# Altium footprint library CHIP-Library.PcbLib: 345 footprints (part 4 of 22)
Each footprint in its own frame and in the unit in brackets; x right, y up, seen from the top. Pads: shape width x height; smd on the part's side, far side on the other; paste and mask are expansions set on the pad; w line width, h text height; cw(c..) or ccw(c..) is an arc to the next point about the centre after c.
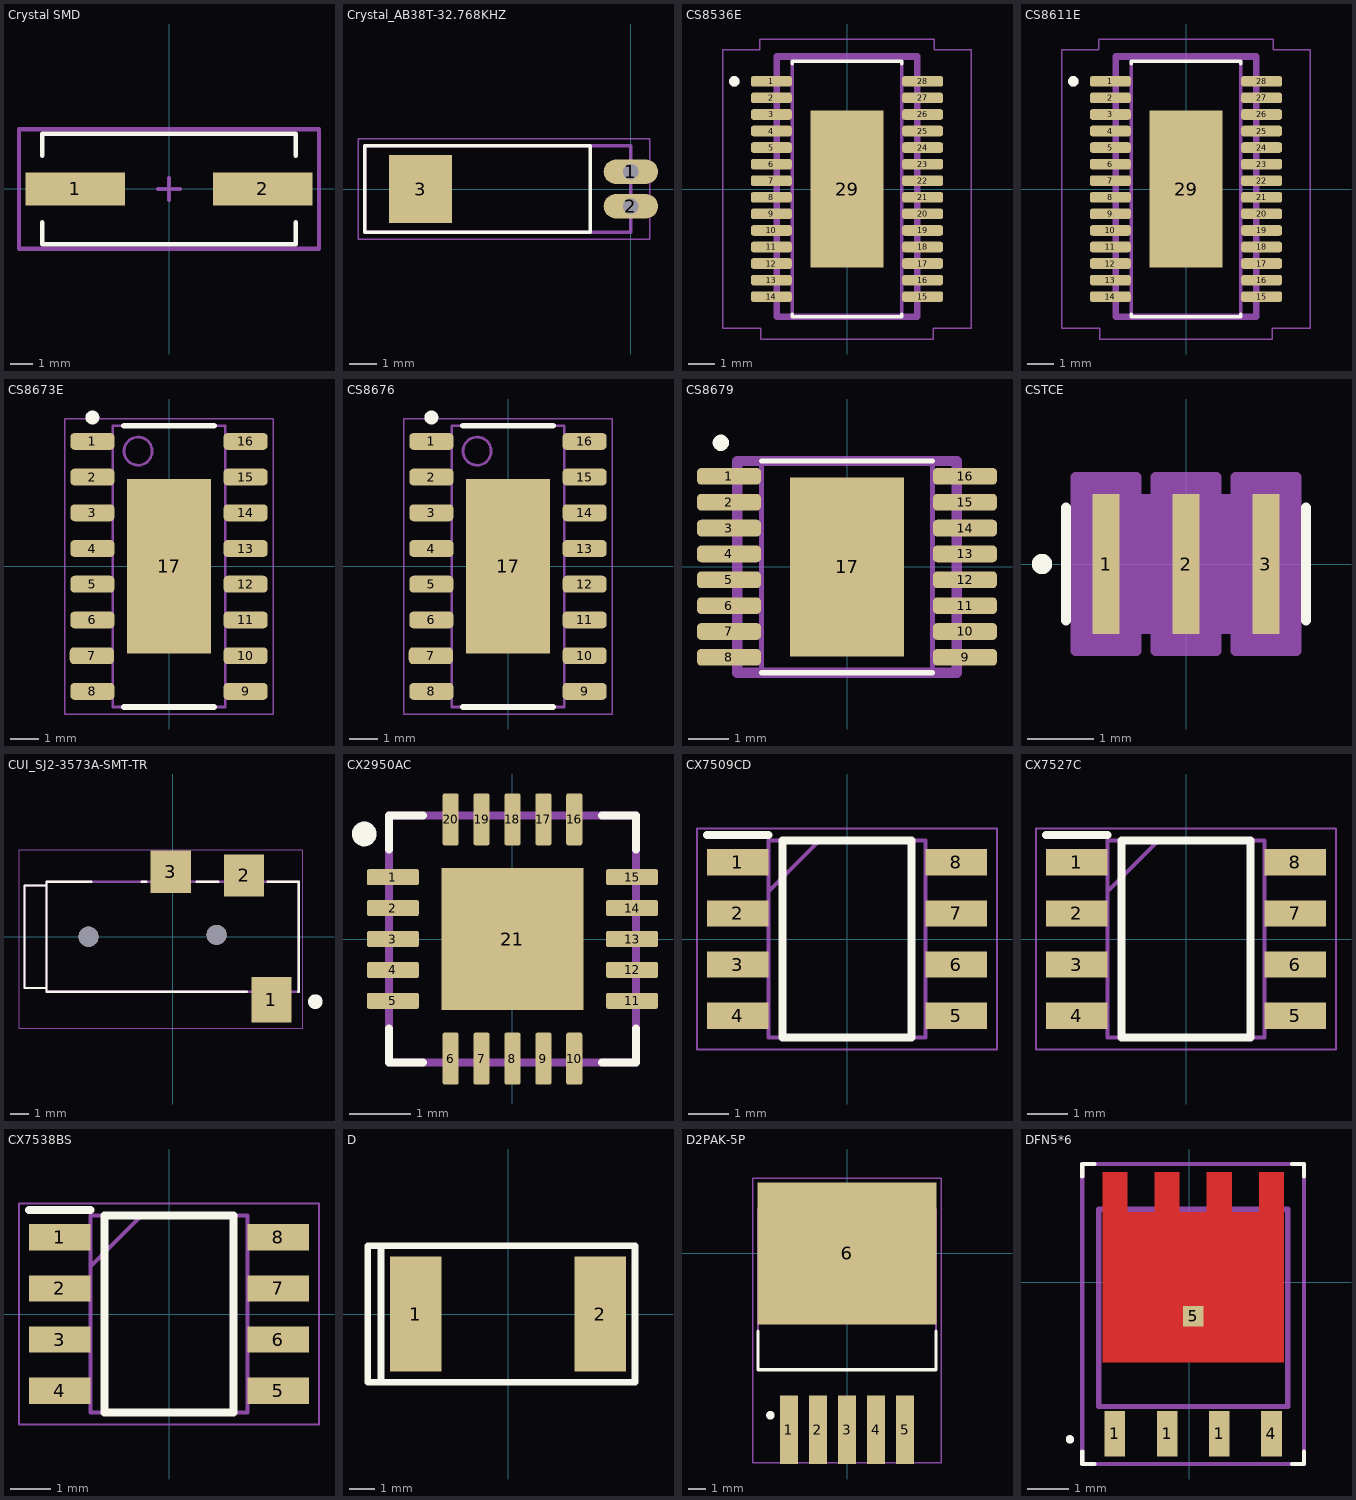
[diagram p3: the footprints below, top view; thin cyan lines are the x and y axes]

## Crystal SMD [mm] "DESIGNER ABBAS BASEREH"
height 4
pads (2):
  rect 4.5x1.5 smd: 1(-4.25,0) 2(4.25,0)
Top Overlay:
  lines w0.2: -5.75,-1.5 -5.75,-2.5 5.75,-2.5 5.75,-1.5 ; -5.75,1.5 -5.75,2.5 5.75,2.5 5.75,1.5
Mechanical 15:
  lines w0.2: -0.5,0 0.5,0 ; 0,-0.5 0,0.5 ; -6.8,-2.7 6.8,-2.7 6.8,2.7 -6.8,2.7 -6.8,-2.7
3D body "User Library-HC49_SMD.STEP": height 5.18, standoff 0, extent -6.209,-2.25 6.091,2.25

## Crystal_AB38T-32.768KHZ [mm] "XTAL_AB38T-32.768KHZ"
height 3.2
pads (3):
  oval 2x0.91 hole 0.56: 1(0,0.635) 2(0,-0.635)
  rect 2.31x2.52 smd: 3(-7.747,0)
Top Overlay:
  lines w0.127: -9.8,-1.6 -1.5,-1.6 -1.5,1.6 -9.8,1.6 -9.8,-1.6
Mechanical 13:
  lines w0.127: -9.8,-1.6 0,-1.6 0,1.6 -9.8,1.6 -9.8,-1.6
Mechanical 15:
  lines w0.05: -10.05,-1.85 0.705,-1.85 0.705,1.85 -10.05,1.85 -10.05,-1.85
3D body "User Library-KDS-DT-38.step": height 3.1, standoff -2.5, extent -9.525,-1.27 1.651,1.708

## CS8536E [mm] "EQA28"
height 4.32
pads (29):
  rrect50% 1.57x0.41 smd paste-1: 1(-2.9,4.127) 2(-2.9,3.492) 3(-2.9,2.858) 4(-2.9,2.222) 5(-2.9,1.587) 6(-2.9,0.953) 7(-2.9,0.318) 8(-2.9,-0.318) 9(-2.9,-0.953) 10(-2.9,-1.587) 11(-2.9,-2.222) 12(-2.9,-2.858) 13(-2.9,-3.492) 14(-2.9,-4.127) 15(2.9,-4.127) 16(2.9,-3.493) 17(2.9,-2.858) 18(2.9,-2.223) 19(2.9,-1.588) 20(2.9,-0.953) 21(2.9,-0.318) 22(2.9,0.317) 23(2.9,0.952) 24(2.9,1.587) 25(2.9,2.222) 26(2.9,2.857) 27(2.9,3.492) 28(2.9,4.127)
  rect 2.8x6 smd paste-3: 29(0,0)
Top Overlay:
  circle w0.2: c-4.318,4.127 r0.1
  lines w0.127: -2.1,-4.8 -2.1,-4.9 2.1,-4.9 2.1,-4.8 ; -2.1,4.8 -2.1,4.9 2.1,4.9 2.1,4.8
Top Paste:
  rectangle: 2.124,3.977 3.674,4.277
  rectangle: 2.125,3.342 3.675,3.642
  rectangle: 2.124,2.707 3.674,3.007
  rectangle: 2.124,2.073 3.674,2.373
  rectangle: 2.125,1.437 3.675,1.737
  rectangle: 2.124,0.803 3.674,1.103
  rectangle: 2.125,0.168 3.675,0.468
  rectangle: 2.126,-0.467 3.676,-0.167
  rectangle: 2.124,-1.102 3.674,-0.802
  rectangle: 2.125,-1.737 3.675,-1.437
  rectangle: 2.124,-2.372 3.674,-2.072
  rectangle: 2.126,-3.007 3.676,-2.707
  rectangle: 2.126,-3.643 3.676,-3.343
  rectangle: 2.125,-4.278 3.675,-3.978
  rectangle: -0.775,-1.887 0.775,-1.587
  rectangle: -0.775,-1.301 0.775,-1.001
  rectangle: -0.775,-0.716 0.775,-0.416
  rectangle: -0.775,-0.13 0.775,0.17
  rectangle: -0.776,0.456 0.774,0.756
  rectangle: -0.775,1.042 0.775,1.342
  rectangle: -0.775,1.629 0.775,1.929
  rectangle: -3.674,-4.278 -2.124,-3.978
  rectangle: -3.675,-3.642 -2.125,-3.342
  rectangle: -3.674,-3.007 -2.124,-2.707
  rectangle: -3.675,-2.372 -2.125,-2.072
  rectangle: -3.675,-1.738 -2.125,-1.438
  rectangle: -3.674,-1.103 -2.124,-0.803
  rectangle: -3.675,-0.468 -2.125,-0.168
  rectangle: -3.676,0.167 -2.126,0.467
  rectangle: -3.674,0.802 -2.124,1.102
  rectangle: -3.675,1.437 -2.125,1.737
  rectangle: -3.675,2.073 -2.125,2.373
  rectangle: -3.676,2.707 -2.126,3.007
  rectangle: -3.675,3.977 -2.125,4.277
  rectangle: -3.676,3.343 -2.126,3.643
Bottom Solder:
  rectangle: -1.651,-4.445 1.651,4.318
Top Courtyard:
  lines w0.254: 2.7,5.08 2.7,-4.9 -2.7,-4.9 -2.7,5.08 2.7,5.08 ; 2.7,5.08 2.7,5.08
Mechanical 13:
  circle w0.2: c-4.318,4.127 r0.1
  lines w0.127: -2.1,-4.9 -2.1,4.9 ; 2.1,-4.9 2.1,4.9
Mechanical 15:
  lines w0.05: -4.76,-5.33 -3.3,-5.33 -3.3,-5.75 3.3,-5.75 3.3,-5.33 4.76,-5.33 4.76,5.33 3.35,5.33 3.35,5.75 -3.35,5.75 -3.35,5.33 -4.76,5.33 -4.76,-5.33
3D body "SOP127P600-8N.step": height 2.65, standoff 0, extent -3.15,-5 3.15,5

## CS8611E [mm] "EQA28"
height 4.32
pads (29):
  rrect50% 1.57x0.41 smd paste-1: 1(-2.9,4.127) 2(-2.9,3.492) 3(-2.9,2.858) 4(-2.9,2.222) 5(-2.9,1.587) 6(-2.9,0.953) 7(-2.9,0.318) 8(-2.9,-0.318) 9(-2.9,-0.953) 10(-2.9,-1.587) 11(-2.9,-2.222) 12(-2.9,-2.858) 13(-2.9,-3.492) 14(-2.9,-4.127) 15(2.9,-4.127) 16(2.9,-3.493) 17(2.9,-2.858) 18(2.9,-2.223) 19(2.9,-1.588) 20(2.9,-0.953) 21(2.9,-0.318) 22(2.9,0.317) 23(2.9,0.952) 24(2.9,1.587) 25(2.9,2.222) 26(2.9,2.857) 27(2.9,3.492) 28(2.9,4.127)
  rect 2.8x6 smd paste-3: 29(0,0)
Top Overlay:
  circle w0.2: c-4.318,4.127 r0.1
  lines w0.127: -2.1,-4.8 -2.1,-4.9 2.1,-4.9 2.1,-4.8 ; -2.1,4.8 -2.1,4.9 2.1,4.9 2.1,4.8
Top Paste:
  rectangle: -3.676,3.343 -2.126,3.643
  rectangle: -3.675,3.977 -2.125,4.277
  rectangle: -3.676,2.707 -2.126,3.007
  rectangle: -3.675,2.073 -2.125,2.373
  rectangle: -3.675,1.437 -2.125,1.737
  rectangle: -3.674,0.802 -2.124,1.102
  rectangle: -3.676,0.167 -2.126,0.467
  rectangle: -3.675,-0.468 -2.125,-0.168
  rectangle: -3.674,-1.103 -2.124,-0.803
  rectangle: -3.675,-1.738 -2.125,-1.438
  rectangle: -3.675,-2.372 -2.125,-2.072
  rectangle: -3.674,-3.007 -2.124,-2.707
  rectangle: -3.675,-3.642 -2.125,-3.342
  rectangle: -3.674,-4.278 -2.124,-3.978
  rectangle: -0.775,1.629 0.775,1.929
  rectangle: -0.775,1.042 0.775,1.342
  rectangle: -0.776,0.456 0.774,0.756
  rectangle: -0.775,-0.13 0.775,0.17
  rectangle: -0.775,-0.716 0.775,-0.416
  rectangle: -0.775,-1.301 0.775,-1.001
  rectangle: -0.775,-1.887 0.775,-1.587
  rectangle: 2.125,-4.278 3.675,-3.978
  rectangle: 2.126,-3.643 3.676,-3.343
  rectangle: 2.126,-3.007 3.676,-2.707
  rectangle: 2.124,-2.372 3.674,-2.072
  rectangle: 2.125,-1.737 3.675,-1.437
  rectangle: 2.124,-1.102 3.674,-0.802
  rectangle: 2.126,-0.467 3.676,-0.167
  rectangle: 2.125,0.168 3.675,0.468
  rectangle: 2.124,0.803 3.674,1.103
  rectangle: 2.125,1.437 3.675,1.737
  rectangle: 2.124,2.073 3.674,2.373
  rectangle: 2.124,2.707 3.674,3.007
  rectangle: 2.125,3.342 3.675,3.642
  rectangle: 2.124,3.977 3.674,4.277
Bottom Solder:
  rectangle: -1.651,-4.445 1.651,4.318
Top Courtyard:
  lines w0.254: 2.7,5.08 -2.7,5.08 -2.7,-4.9 2.7,-4.9 2.7,5.08 ; 2.7,5.08 2.7,5.08
Mechanical 13:
  circle w0.2: c-4.318,4.127 r0.1
  lines w0.127: -2.1,-4.9 -2.1,4.9 ; 2.1,-4.9 2.1,4.9
Mechanical 15:
  lines w0.05: -4.76,-5.33 -4.76,5.33 -3.35,5.33 -3.35,5.75 3.35,5.75 3.35,5.33 4.76,5.33 4.76,-5.33 3.3,-5.33 3.3,-5.75 -3.3,-5.75 -3.3,-5.33 -4.76,-5.33
3D body "SOP127P600-8N.step": height 2.65, standoff 0, extent -3.15,-5 3.15,5

## CS8673E [mm] "ESOP16"
height 2.65
pads (17):
  rrect50% 1.57x0.6 smd paste-1: 1(-2.725,4.445) 2(-2.725,3.175) 3(-2.725,1.905) 4(-2.725,0.635) 5(-2.725,-0.632) 6(-2.725,-1.905) 7(-2.746,-3.179) 8(-2.725,-4.445) 9(2.725,-4.445) 10(2.725,-3.179) 11(2.725,-1.905) 12(2.725,-0.632) 13(2.725,0.635) 14(2.725,1.905) 15(2.725,3.175) 16(2.725,4.445)
  rect 3x6.2 smd paste-2539.97: 17(0,0)
Top Overlay:
  circle w0.25: c-2.725,5.295 r0.125
  lines w0.2: -1.6,-5 1.6,-5 ; -1.6,5 1.6,5
Top Paste:
  rectangle: -0.775,-2.816 0.775,-2.516
  rectangle: -0.775,-2.27 0.775,-1.97
  rectangle: -0.775,-1.724 0.775,-1.424
  rectangle: -0.775,-1.178 0.775,-0.878
  rectangle: -0.775,-0.632 0.775,-0.332
  rectangle: -0.775,2.645 0.775,2.945
  rectangle: -0.775,2.098 0.775,2.398
  rectangle: -0.775,1.552 0.775,1.852
  rectangle: -0.775,1.006 0.775,1.306
  rectangle: -0.775,0.46 0.775,0.76
  rectangle: -0.775,-0.086 0.775,0.214
  rectangle: 2,-0.835 3.45,-0.435
  rectangle: 2,0.435 3.45,0.835
  rectangle: 2,1.705 3.45,2.105
  rectangle: 2,2.975 3.45,3.375
  rectangle: 2,4.245 3.45,4.645
  rectangle: 2,-2.105 3.45,-1.705
  rectangle: 2,-3.375 3.45,-2.975
  rectangle: 2,-4.645 3.45,-4.245
  rectangle: -3.45,-0.835 -2,-0.435
  rectangle: -3.45,0.435 -2,0.835
  rectangle: -3.45,1.705 -2,2.105
  rectangle: -3.45,2.975 -2,3.375
  rectangle: -3.45,4.245 -2,4.645
  rectangle: -3.45,-2.105 -2,-1.705
  rectangle: -3.45,-3.375 -2,-2.975
  rectangle: -3.45,-4.645 -2,-4.245
Top Assembly:
  circle w0.1: c-1.1,4.1 r0.5
  lines w0.1: -2,-5 2,-5 2,5 -2,5 -2,-5
Top Courtyard:
  lines w0.05: -3.7,-5.25 3.7,-5.25 3.7,5.25 -3.7,5.25 -3.7,-5.25
  lines w0.1: -0.5,0 0.5,0 ; 0,-0.5 0,0.5
3D body "CS8673E.step": height 2.65, standoff 0, extent -3,-5 3,5

## CS8676 [mm] "ESOP16"
height 2.65
pads (17):
  rrect50% 1.57x0.6 smd paste-1: 1(-2.725,4.445) 2(-2.725,3.175) 3(-2.725,1.905) 4(-2.725,0.635) 5(-2.725,-0.632) 6(-2.725,-1.905) 7(-2.746,-3.179) 8(-2.725,-4.445) 9(2.725,-4.445) 10(2.725,-3.179) 11(2.725,-1.905) 12(2.725,-0.632) 13(2.725,0.635) 14(2.725,1.905) 15(2.725,3.175) 16(2.725,4.445)
  rect 3x6.2 smd paste-2539.97: 17(0,0)
Top Overlay:
  circle w0.25: c-2.725,5.295 r0.125
  lines w0.2: -1.6,-5 1.6,-5 ; -1.6,5 1.6,5
Top Paste:
  rectangle: -0.775,-2.816 0.775,-2.516
  rectangle: -0.775,-2.27 0.775,-1.97
  rectangle: -0.775,-1.724 0.775,-1.424
  rectangle: -0.775,-1.178 0.775,-0.878
  rectangle: -0.775,-0.632 0.775,-0.332
  rectangle: -0.775,2.645 0.775,2.945
  rectangle: -0.775,2.098 0.775,2.398
  rectangle: -0.775,1.552 0.775,1.852
  rectangle: -0.775,1.006 0.775,1.306
  rectangle: -0.775,0.46 0.775,0.76
  rectangle: -0.775,-0.086 0.775,0.214
  rectangle: 2,-0.835 3.45,-0.435
  rectangle: 2,0.435 3.45,0.835
  rectangle: 2,1.705 3.45,2.105
  rectangle: 2,2.975 3.45,3.375
  rectangle: 2,4.245 3.45,4.645
  rectangle: 2,-2.105 3.45,-1.705
  rectangle: 2,-3.375 3.45,-2.975
  rectangle: 2,-4.645 3.45,-4.245
  rectangle: -3.45,-0.835 -2,-0.435
  rectangle: -3.45,0.435 -2,0.835
  rectangle: -3.45,1.705 -2,2.105
  rectangle: -3.45,2.975 -2,3.375
  rectangle: -3.45,4.245 -2,4.645
  rectangle: -3.45,-2.105 -2,-1.705
  rectangle: -3.45,-3.375 -2,-2.975
  rectangle: -3.45,-4.645 -2,-4.245
Top Assembly:
  circle w0.1: c-1.1,4.1 r0.5
  lines w0.1: -2,-5 2,-5 2,5 -2,5 -2,-5
Top Courtyard:
  lines w0.05: -3.7,-5.25 3.7,-5.25 3.7,5.25 -3.7,5.25 -3.7,-5.25
  lines w0.1: -0.5,0 0.5,0 ; 0,-0.5 0,0.5
3D body "CS8673E.step": height 2.65, standoff 0, extent -3,-5 3,5

## CS8679 [mm] "EQA16"
height 4.32
pads (17):
  rrect50% 1.57x0.41 smd paste-1: 1(-2.9,2.222) 2(-2.9,1.587) 3(-2.9,0.953) 4(-2.9,0.318) 5(-2.9,-0.318) 6(-2.9,-0.953) 7(-2.9,-1.587) 8(-2.9,-2.223) 9(2.9,-2.223) 10(2.9,-1.588) 11(2.9,-0.953) 12(2.9,-0.318) 13(2.9,0.317) 14(2.9,0.952) 15(2.9,1.587) 16(2.9,2.222)
  rect 2.8x4.4 smd paste-3: 17(0,0)
Top Overlay:
  circle w0.2: c-3.099,3.048 r0.1
  lines w0.127: -2.1,-2.6 2.1,-2.6 ; -2.1,2.6 2.1,2.6
Top Paste:
  rectangle: 2.124,2.073 3.674,2.373
  rectangle: 2.125,1.437 3.675,1.737
  rectangle: 2.124,0.803 3.674,1.103
  rectangle: 2.125,0.168 3.675,0.468
  rectangle: 2.126,-0.467 3.676,-0.167
  rectangle: 2.124,-1.102 3.674,-0.802
  rectangle: 2.125,-1.737 3.675,-1.437
  rectangle: 2.124,-2.372 3.674,-2.072
  rectangle: -0.775,-1.887 0.775,-1.587
  rectangle: -0.775,-1.301 0.775,-1.001
  rectangle: -0.775,-0.716 0.775,-0.416
  rectangle: -0.775,-0.13 0.775,0.17
  rectangle: -0.776,0.456 0.774,0.756
  rectangle: -0.775,1.042 0.775,1.342
  rectangle: -0.775,1.629 0.775,1.929
  rectangle: -3.675,-1.738 -2.125,-1.438
  rectangle: -3.674,-1.103 -2.124,-0.803
  rectangle: -3.675,-0.468 -2.125,-0.168
  rectangle: -3.676,0.167 -2.126,0.467
  rectangle: -3.674,0.802 -2.124,1.102
  rectangle: -3.675,1.437 -2.125,1.737
  rectangle: -3.675,2.073 -2.125,2.373
  rectangle: -3.675,-2.373 -2.125,-2.073
Bottom Solder:
  rectangle: -1.651,-2.6 1.651,2.6
Top Courtyard:
  lines w0.254: -2.7,-2.6 -2.7,2.6 2.7,2.6 2.7,-2.6 -2.7,-2.6
Mechanical 13:
  lines w0.127: -2.1,-2.6 -2.1,2.5 ; 2.1,-2.6 2.1,2.5
3D body "cs8679ee.step": height 2.65, standoff 0, extent -3.15,-2.5 3.15,2.5

## CSTCE [mil]
pads (3):
  rect 16x83 smd: 1(-47.24,0) 2(0,0) 3(47.24,0)
Top Overlay:
  circle w6: c-85.24,0 r3
  lines w6: -71,-33.5 -71,33.5 ; 71,-33.5 71,33.5
Mechanical 13:
  circle w0: c-63,0 r3
Mechanical 15:
  region: -65.24,-51.5 -65.24,51.5 -29.24,51.5 -29.24,38.5 -18,38.5 -18,51.5 18,51.5 18,38.5 29.24,38.5 29.24,51.5 65.24,51.5 65.24,-51.5 29.24,-51.5 29.24,-38.5 18,-38.5 18,-51.5 -18,-51.5 -18,-38.5 -29.24,-38.5 -29.24,-51.5
  region: 66,-28.5 -66,-28.5 -66,28.5 66,28.5
  lines w6: -65.24,-51.5 -65.24,51.5 -29.24,51.5 -29.24,38.5 -18,38.5 -18,51.5 18,51.5 18,38.5 29.24,38.5 29.24,51.5 65.24,51.5 65.24,-51.5 29.24,-51.5 29.24,-38.5 18,-38.5 18,-51.5 -18,-51.5 -18,-38.5 -29.24,-38.5 -29.24,-51.5 -65.24,-51.5
3D body "CSTCE12M0G15L99-R0--3DModel-STEP-56544.STEP": height 39.87, standoff 0.5, extent -62.99,-25.59 63,25.59

## CUI_SJ2-3573A-SMT-TR [mm]
pads (5):
  rect 2.2x2.5 smd: 1(5.4,-3.45)
  rect 2.2x2.3 smd: 2(3.9,3.35) 3(-0.1,3.55)
  round 1.1 hole 1.1 unplated: ""(-4.6,0) ""(2.4,0.1)
Top Overlay:
  circle w0.4: c7.8,-3.55 r0.2
  lines w0.127: -6.9,2.8 -8.1,2.8 -8.1,-2.8 -6.9,-2.8 ; -4.45,3 -6.9,3 -6.9,-2.8 ; -1.7,3 -1.45,3 ; 1.3,3 2.5,3 ; 4.05,-3 -6.9,-3 -6.9,-2.8 ; 5.2,3 6.9,3 6.9,-3 6.85,-3
Mechanical 13:
  lines w0.127: -6.9,-2.8 -8.1,-2.8 -8.1,2.8 -6.9,2.8 ; -6.9,-2.8 -6.9,2.8 ; -6.9,-2.8 -6.9,-3 6.9,-3 6.9,3 -6.9,3 -6.9,2.8
Mechanical 15:
  lines w0.05: -8.4,-5 -8.4,4.75 7.1,4.75 7.1,-5 -8.4,-5

## CX2950AC [mm] "QFN20_4X4"
pads (21):
  rrect25% 0.84x0.26 smd paste-0.13 mask+0.102: 1(-1.935,1) 2(-1.935,0.5) 3(-1.935,0) 4(-1.935,-0.5) 5(-1.935,-1) 11(1.935,-1) 12(1.935,-0.5) 13(1.935,0) 14(1.935,0.5) 15(1.935,1)
  rrect25% 0.26x0.84 smd paste-0.13 mask+0.102: 6(-1,-1.935) 7(-0.5,-1.935) 8(0,-1.935) 9(0.5,-1.935) 10(1,-1.935) 16(1,1.935) 17(0.5,1.935) 18(0,1.935) 19(-0.5,1.935) 20(-1,1.935)
  rect 2.3x2.3 smd paste-1.15 mask+0.102: 21(0,0)
Top Overlay:
  circle w0.2: c-2.4,1.7 r0.1
  lines w0.127: -2,-1.45 -2,-2 -1.45,-2 ; -2,1.45 -2,2 -1.45,2 ; 1.45,-2 2,-2 2,-1.45 ; 1.45,2 2,2 2,1.45
Top Paste:
  rectangle: -1.1,-1.1 -0.7,-0.7
  rectangle: -0.5,-1.1 -0.1,-0.7
  rectangle: 0.1,-1.1 0.5,-0.7
  rectangle: 0.7,-1.1 1.1,-0.7
  rectangle: -1.1,-0.5 -0.7,-0.1
  rectangle: -0.5,-0.5 -0.1,-0.1
  rectangle: 0.1,-0.5 0.5,-0.1
  rectangle: 0.7,-0.5 1.1,-0.1
  rectangle: -1.1,0.1 -0.7,0.5
  rectangle: -0.5,0.1 -0.1,0.5
  rectangle: 0.1,0.1 0.5,0.5
  rectangle: 0.7,0.1 1.1,0.5
  rectangle: -1.1,0.7 -0.7,1.1
  rectangle: -0.5,0.7 -0.1,1.1
  rectangle: 0.1,0.7 0.5,1.1
  rectangle: 0.7,0.7 1.1,1.1
  rectangle: -2.355,0.9 -1.515,1.1
  rectangle: -2.355,0.4 -1.515,0.6
  rectangle: -2.355,-0.1 -1.515,0.1
  rectangle: -2.355,-0.6 -1.515,-0.4
  rectangle: -2.355,-1.1 -1.515,-0.9
  rectangle: 1.515,0.9 2.355,1.1
  rectangle: 1.515,0.4 2.355,0.6
  rectangle: 1.515,-0.1 2.355,0.1
  rectangle: 1.515,-0.6 2.355,-0.4
  rectangle: 1.515,-1.1 2.355,-0.9
  region: -0.9,-2.355 -0.9,-1.515 -1.1,-1.515 -1.1,-2.355
  region: -0.4,-2.355 -0.4,-1.515 -0.6,-1.515 -0.6,-2.355
  region: 0.1,-2.355 0.1,-1.515 -0.1,-1.515 -0.1,-2.355
  region: 0.6,-2.355 0.6,-1.515 0.4,-1.515 0.4,-2.355
  region: 1.1,-2.355 1.1,-1.515 0.9,-1.515 0.9,-2.355
  region: -0.9,1.515 -0.9,2.355 -1.1,2.355 -1.1,1.515
  region: -0.4,1.515 -0.4,2.355 -0.6,2.355 -0.6,1.515
  region: 0.1,1.515 0.1,2.355 -0.1,2.355 -0.1,1.515
  region: 0.6,1.515 0.6,2.355 0.4,2.355 0.4,1.515
  region: 1.1,1.515 1.1,2.355 0.9,2.355 0.9,1.515
Top Courtyard:
  lines w0.1: -2,-2 2,-2 2,2 -2,2 -2,-2
Mechanical 13:
  lines w0.127: -2,-2 -2,2 2,2 2,-2 -2,-2
3D body "PIC16F721-E_ML.STEP": height 1, standoff 0, extent -2,-2 2,2

## CX7509CD [mm] "SOP8"
pads (8):
  rect 1.525x0.65 smd: 1(-2.712,1.905) 2(-2.712,0.635) 3(-2.712,-0.635) 4(-2.712,-1.905) 5(2.712,-1.905) 6(2.712,-0.635) 7(2.712,0.635) 8(2.712,1.905)
Top Overlay:
  lines w0.2: -3.475,2.58 -1.95,2.58 ; -1.6,-2.45 1.6,-2.45 1.6,2.45 -1.6,2.45 -1.6,-2.45
Mechanical 13:
  lines w0.1: -1.95,1.18 -0.68,2.45 ; -1.95,-2.45 1.95,-2.45 1.95,2.45 -1.95,2.45 -1.95,-2.45
Mechanical 15:
  lines w0.05: -3.725,-2.75 3.725,-2.75 3.725,2.75 -3.725,2.75 -3.725,-2.75
3D body "FR9886SOGTR.stp": height 1.75, standoff 0, extent -3,-2.45 3,2.45

## CX7527C [mm] "SOP8"
pads (8):
  rect 1.525x0.65 smd: 1(-2.712,1.905) 2(-2.712,0.635) 3(-2.712,-0.635) 4(-2.712,-1.905) 5(2.712,-1.905) 6(2.712,-0.635) 7(2.712,0.635) 8(2.712,1.905)
Top Overlay:
  lines w0.2: -3.475,2.58 -1.95,2.58 ; -1.6,-2.45 -1.6,2.45 1.6,2.45 1.6,-2.45 -1.6,-2.45
Mechanical 13:
  lines w0.1: -1.95,1.18 -0.68,2.45 ; -1.95,-2.45 -1.95,2.45 1.95,2.45 1.95,-2.45 -1.95,-2.45
Mechanical 15:
  lines w0.05: -3.725,-2.75 -3.725,2.75 3.725,2.75 3.725,-2.75 -3.725,-2.75
3D body "FR9886SOGTR.stp": height 1.75, standoff 0, extent -3,-2.45 3,2.45

## CX7538BS [mm] "SOP8"
pads (8):
  rect 1.525x0.65 smd: 1(-2.712,1.905) 2(-2.712,0.635) 3(-2.712,-0.635) 4(-2.712,-1.905) 5(2.712,-1.905) 6(2.712,-0.635) 7(2.712,0.635) 8(2.712,1.905)
Top Overlay:
  lines w0.2: -3.475,2.58 -1.95,2.58 ; -1.6,-2.45 1.6,-2.45 1.6,2.45 -1.6,2.45 -1.6,-2.45
Mechanical 13:
  lines w0.1: -1.95,1.18 -0.68,2.45 ; -1.95,-2.45 1.95,-2.45 1.95,2.45 -1.95,2.45 -1.95,-2.45
Mechanical 15:
  lines w0.05: -3.725,-2.75 3.725,-2.75 3.725,2.75 -3.725,2.75 -3.725,-2.75
3D body "FR9886SOGTR.stp": height 1.75, standoff 0, extent -3,-2.45 3,2.45

## D [mm]
pads (2):
  rect 2x4.5 smd: 1(-3.6,0) 2(3.6,0)
Top Overlay:
  lines w0.254: -4.953,-2.667 -4.953,2.667 ; -4.953,-2.667 -5.461,-2.667 -5.461,2.667 -4.953,2.667 ; -4.953,-2.667 -4.166,-2.667 4.953,-2.667 4.953,2.667 -4.953,2.667

## D2PAK-5P [mm]
height 9.45
pads (6):
  rect 1.05x4 smd: 1(-3.4,-10.3) 2(-1.7,-10.3) 3(0,-10.3) 4(1.7,-10.3) 5(3.4,-10.3)
  rect 10.45x8.3 smd paste-5: 6(0,0)
Top Overlay:
  circle w0.25: c-4.475,-9.45 r0.125
  lines w0.2: -5.2,-4.55 -5.2,-6.8 5.2,-6.8 5.2,-4.55
Top Paste:
  region: 5,-0.5 0.5,-0.5 0.5,-4 5,-4
  rectangle: -5,-4 -0.5,-0.5
  region: 5,4 0.5,4 0.5,0.5 5,0.5
  rectangle: -5,0.5 -0.5,4
Mechanical 13:
  lines w0.1: -5.2,-6.8 -5.2,2.6 5.2,2.6 5.2,-6.8 -5.2,-6.8
Mechanical 15:
  lines w0.1: -5.5,-12.225 -5.5,4.4 5.5,4.4 5.5,-12.225 -5.5,-12.225
3D body: height 4.65, standoff 0, extent -5.2,-6.8 5.2,2.6

## DFN5*6 [mm]
pads (5):
  rect 0.5x1.1 smd paste-1: 1(-1.805,-3.688) 1(-0.535,-3.688) 1(0.735,-3.688) 4(2.005,-3.688)
  rect 0.5x0.5 smd paste-1 mask+0: 5(0.1,-0.825)
Top Layer:
  region: -1.505,2.675 -1.505,1.7 -0.835,1.7 -0.835,2.675 -0.235,2.675 -0.235,1.7 0.435,1.7 0.435,2.675 1.035,2.675 1.035,1.7 1.705,1.7 1.705,2.675 2.305,2.675 2.305,-1.955 -2.105,-1.955 -2.105,2.675
Top Overlay:
  circle w0.1: c-2.9,-3.825 r0.05
  lines w0.1: -2.6,-4.125 -2.6,-4.425 -2.3,-4.425 ; -2.6,2.575 -2.6,2.875 -2.3,2.875 ; 2.5,-4.425 2.8,-4.425 2.8,-4.125 ; 2.5,2.875 2.8,2.875 2.8,2.575
Top Paste:
  region: 1.7,1.5 1.7,0 0.2,0 0.2,1.5
  region: 1.7,-0.2 1.7,-1.7 0.2,-1.7 0.2,-0.2
  region: 0,1.5 0,0 -1.5,0 -1.5,1.5
  region: 0,-0.2 0,-1.7 -1.5,-1.7 -1.5,-0.2
  region: 2.255,2.45 2.255,1.7 1.755,1.7 1.755,2.45
  region: 0.985,2.45 0.985,1.7 0.485,1.7 0.485,2.45
  region: -1.555,2.45 -1.555,1.7 -2.055,1.7 -2.055,2.45
  region: -0.285,2.45 -0.285,1.7 -0.785,1.7 -0.785,2.45
  region: 2.205,-3.276 2.205,-4.1 1.805,-4.1 1.805,-3.276
  region: 0.935,-3.276 0.935,-4.1 0.535,-4.1 0.535,-3.276
  region: -1.605,-3.276 -1.605,-4.1 -2.005,-4.1 -2.005,-3.276
  region: -0.335,-3.276 -0.335,-4.1 -0.735,-4.1 -0.735,-3.276
Top Solder:
  region: -1.405,2.775 -1.405,1.8 -0.935,1.8 -0.935,2.775 -0.135,2.775 -0.135,1.8 0.335,1.8 0.335,2.775 1.135,2.775 1.135,1.8 1.605,1.8 1.605,2.775 2.405,2.775 2.405,-2.055 -2.205,-2.055 -2.205,2.775
Mechanical 13:
  circle w0.1: c-2.9,-3.825 r0.05
  lines w0.127: -2.2,-3.025 -2.2,1.775 2.4,1.775 2.4,-3.025 -2.2,-3.025
Mechanical 15:
  lines w0.1: -0.4,-0.825 0.6,-0.825 ; 0.1,-1.325 0.1,-0.325 ; -2.6,-4.425 2.4,-4.425 2.8,-4.425 2.8,2.475 2.8,2.875 -2.6,2.875 -2.6,-4.425
3D body "BSC0901NSI.STEP": height 1.1, standoff 0, extent -2.475,-3.9 2.675,2.25